# Altium footprint library PCB - LEADLESS - DFN - TI 3-XFDFN F4 YJC.PCBLIB: 1 footprints
Each footprint in its own frame and in the unit in brackets; x right, y up, seen from the top. Pads: shape width x height; smd on the part's side, far side on the other; paste and mask are expansions set on the pad; w line width, h text height; cw(c..) or ccw(c..) is an arc to the next point about the centre after c.
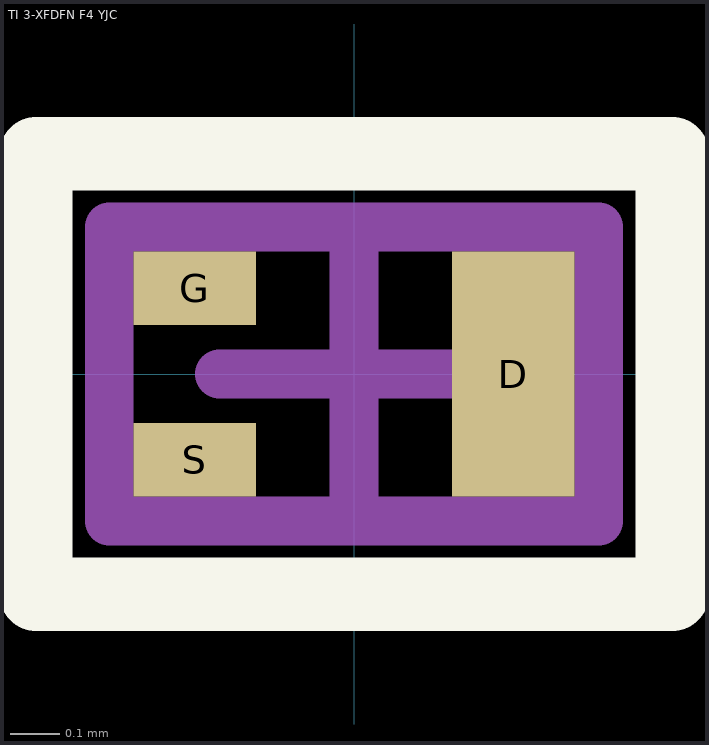
[diagram p0: the footprint, top view; thin cyan lines are the x and y axes]

## TI 3-XFDFN F4 YJC [mm] "PICOSTAR F4(YJC), 3-Leads, Body 1.00x.0.60mm, Pitch 0.175mm, IPC Medium Density"
height 0.35
pads (3):
  rect 0.25x0.5 smd: D(0.325,0)
  rect 0.25x0.15 smd: G(-0.325,0.175) S(-0.325,-0.175)
Top Overlay:
  lines w0.15: -0.65,-0.45 -0.65,0.45 0.65,0.45 0.65,-0.45 -0.65,-0.45
Mechanical 13:
  lines w0.1: -0.5,-0.3 -0.5,0.3 0.5,0.3 0.5,-0.3 -0.5,-0.3
Mechanical 15:
  lines w0.05: -0.65,-0.45 -0.65,0.45 0.65,0.45 0.65,-0.45 -0.65,-0.45
  lines w0.1: -0.275,0 0.275,0 ; 0,-0.275 0,0.275
3D body: height 0.35, standoff 0, extent -0.5,-0.3 0.5,0.3